# Altium schematic symbol library MURS120-13-F.SchLib: 1 symbol
Pins are listed as number, name and electrical type; pins without a type are passive.

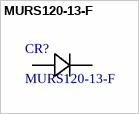
[diagram p0: symbol MURS120-13-F]

## MURS120-13-F
designator CR?
Description; Manufacturer_Name: Diodes Inc; Copyright: Copyright (C) 2025 Ultra Librarian. All rights reserved.; Manufacturer_Part_Number: MURS120-13-F
footprint SMB_DIO
pins: 1, 2